# Altium footprint library 2019-12-09_06-57-52.PcbLib: 3 footprints
Each footprint in its own frame and in the unit in brackets; x right, y up, seen from the top. Pads: shape width x height; smd on the part's side, far side on the other; paste and mask are expansions set on the pad; w line width, h text height; cw(c..) or ccw(c..) is an arc to the next point about the centre after c.
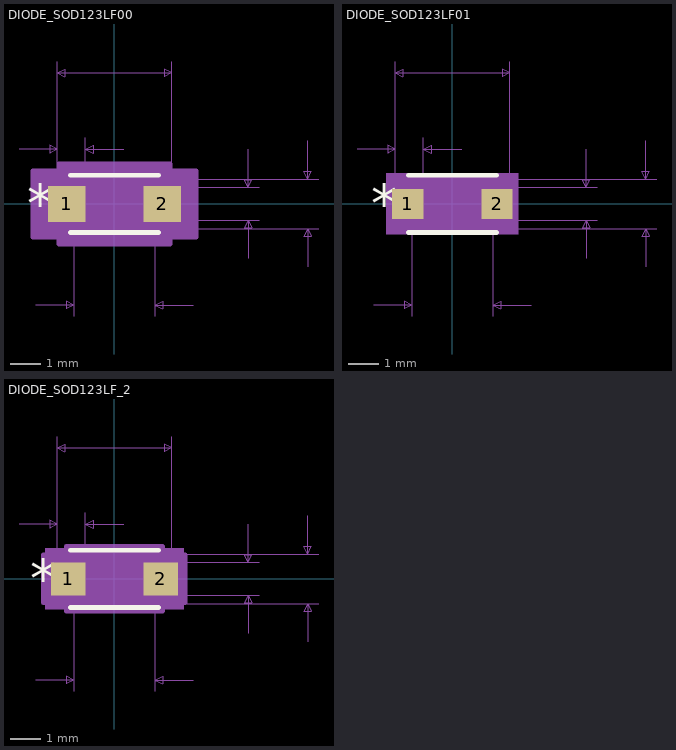
[diagram p0: the footprints below, top view; thin cyan lines are the x and y axes]

## DIODE_SOD123LF00 [mil]
pads (2):
  rect 49x47 smd paste+0 mask+0: 1(-62.5,0) 2(62.5,0)
Top Overlay:
  lines w6: -58,-37.5 58,-37.5 ; -58,37.5 58,37.5
  text "*" at -114.5,-25 h50
Mechanical 5:
  region: 94.5,-40 -94.5,-40 -94.5,40 94.5,40
Mechanical 7:
  lines w1: -125,71.5 -75,71.5 ; -103,-132.5 -53,-132.5 ; -75,86.5 -75,0 -75,186.5 ; -53,-147.5 -53,0 ; -38,0 -38,86.5 ; 0,-32.5 268,-32.5 ; 0,32.5 268,32.5 ; 12,71.5 -38,71.5 ; 53,-147.5 53,0 ; 75,-21.5 190,-21.5 ; 75,0 75,186.5 ; 75,21.5 190,21.5 ; 103,-132.5 53,-132.5 ; 175,-71.5 175,-21.5 ; 175,71.5 175,21.5 ; 253,-82.5 253,-32.5 ; 253,82.5 253,32.5 ; -75,71.5 -85,76.5 -85,66.5 -75,71.5 ; -75,171.5 75,171.5 ; -75,171.5 -65,176.5 -65,166.5 -75,171.5 ; -53,-132.5 -63,-127.5 -63,-137.5 -53,-132.5 ; -38,71.5 -28,76.5 -28,66.5 -38,71.5 ; 53,-132.5 63,-127.5 63,-137.5 53,-132.5 ; 75,171.5 65,176.5 65,166.5 75,171.5 ; 175,-21.5 170,-31.5 180,-31.5 175,-21.5 ; 175,21.5 170,31.5 180,31.5 175,21.5 ; 253,-32.5 248,-42.5 258,-42.5 253,-32.5 ; 253,32.5 248,42.5 258,42.5 253,32.5
  text "Default Padstyle: RX49Y47D0T" at -350,-348.5 h50
  text "Alt 1 Padstyle: OX60Y90D30P" at -337.5,-423.5 h50
  text "Alt 2 Padstyle: OX90Y60D30P" at -337.5,-498.5 h50
  text "0.15in/3.81mm" at -81.25,191.5 h25
  text "0.037in/0.94mm" at -144,91.5 h25
  text "0.043in/1.092mm" at 195,-12.5 h25
  text "0.065in/1.651mm" at 273,-12.5 h25
  text "0.106in/2.692mm" at -93.75,-177.5 h25
Mechanical 13:
  lines w1: -53,-16.25 -36.75,-32.5 ; -53,16.25 -36.75,32.5 ; -75,-21.5 -75,21.5 -53,21.5 -53,-21.5 -75,-21.5 ; -53,-32.5 53,-32.5 53,32.5 -53,32.5 -53,-32.5 ; 53,-21.5 53,21.5 75,21.5 75,-21.5 53,-21.5
  text "*" at -55.5,-25 h50
Mechanical 15:
  region: -73,-43.5 -107,-43.5 -107,43.5 -73,43.5 -73,52.5 73,52.5 73,43.5 107,43.5 107,-43.5 73,-43.5 73,-52.5 -73,-52.5
  lines w6: -107,-43.5 -107,43.5 -73,43.5 -73,52.5 73,52.5 73,43.5 107,43.5 107,-43.5 73,-43.5 73,-52.5 -73,-52.5 -73,-43.5 -107,-43.5
3D body: height 10, standoff 0, extent 0,0 10,10

## DIODE_SOD123LF01 [mil]
pads (2):
  rect 41x39 smd paste+0 mask+0: 1(-58.5,0) 2(58.5,0)
Top Overlay:
  lines w6: -58,-37.5 58,-37.5 ; -58,37.5 58,37.5
  text "*" at -106.5,-25 h50
Mechanical 5:
  region: 86.5,-40 -86.5,-40 -86.5,40 86.5,40
Mechanical 7:
  lines w1: -125,71.5 -75,71.5 ; -103,-132.5 -53,-132.5 ; -75,86.5 -75,0 -75,186.5 ; -53,-147.5 -53,0 ; -38,0 -38,86.5 ; 0,-32.5 268,-32.5 ; 0,32.5 268,32.5 ; 12,71.5 -38,71.5 ; 53,-147.5 53,0 ; 75,-21.5 190,-21.5 ; 75,0 75,186.5 ; 75,21.5 190,21.5 ; 103,-132.5 53,-132.5 ; 175,-71.5 175,-21.5 ; 175,71.5 175,21.5 ; 253,-82.5 253,-32.5 ; 253,82.5 253,32.5 ; -75,71.5 -85,76.5 -85,66.5 -75,71.5 ; -75,171.5 75,171.5 ; -75,171.5 -65,176.5 -65,166.5 -75,171.5 ; -53,-132.5 -63,-127.5 -63,-137.5 -53,-132.5 ; -38,71.5 -28,76.5 -28,66.5 -38,71.5 ; 53,-132.5 63,-127.5 63,-137.5 53,-132.5 ; 75,171.5 65,176.5 65,166.5 75,171.5 ; 175,-21.5 170,-31.5 180,-31.5 175,-21.5 ; 175,21.5 170,31.5 180,31.5 175,21.5 ; 253,-32.5 248,-42.5 258,-42.5 253,-32.5 ; 253,32.5 248,42.5 258,42.5 253,32.5
  text "Default Padstyle: RX41Y39D0T" at -350,-344.5 h50
  text "Alt 1 Padstyle: OX60Y90D30P" at -337.5,-419.5 h50
  text "Alt 2 Padstyle: OX90Y60D30P" at -337.5,-494.5 h50
  text "0.15in/3.81mm" at -81.25,191.5 h25
  text "0.037in/0.94mm" at -144,91.5 h25
  text "0.043in/1.092mm" at 195,-12.5 h25
  text "0.065in/1.651mm" at 273,-12.5 h25
  text "0.106in/2.692mm" at -93.75,-177.5 h25
Mechanical 13:
  lines w1: -53,-16.25 -36.75,-32.5 ; -53,16.25 -36.75,32.5 ; -75,-21.5 -75,21.5 -53,21.5 -53,-21.5 -75,-21.5 ; -53,-32.5 53,-32.5 53,32.5 -53,32.5 -53,-32.5 ; 53,-21.5 53,21.5 75,21.5 75,-21.5 53,-21.5
  text "*" at -55.5,-25 h50
Mechanical 15:
  region: -57,-23.5 -83,-23.5 -83,23.5 -57,23.5 -57,36.5 57,36.5 57,23.5 83,23.5 83,-23.5 57,-23.5 57,-36.5 -57,-36.5
  lines w6: -83,-23.5 -83,23.5 -57,23.5 -57,36.5 57,36.5 57,23.5 83,23.5 83,-23.5 57,-23.5 57,-36.5 -57,-36.5 -57,-23.5 -83,-23.5
3D body: height 10, standoff 0, extent 0,0 10,10

## DIODE_SOD123LF_2 [mil]
pads (2):
  rect 45x43 smd paste+0 mask+0: 1(-60.5,0) 2(60.5,0)
Top Overlay:
  lines w6: -58,-37.5 58,-37.5 ; -58,37.5 58,37.5
  text "*" at -110.5,-25 h50
Mechanical 5:
  region: 90.5,-40 -90.5,-40 -90.5,40 90.5,40
Mechanical 7:
  lines w1: -125,71.5 -75,71.5 ; -103,-132.5 -53,-132.5 ; -75,86.5 -75,0 -75,186.5 ; -53,-147.5 -53,0 ; -38,0 -38,86.5 ; 0,-32.5 268,-32.5 ; 0,32.5 268,32.5 ; 12,71.5 -38,71.5 ; 53,-147.5 53,0 ; 75,-21.5 190,-21.5 ; 75,0 75,186.5 ; 75,21.5 190,21.5 ; 103,-132.5 53,-132.5 ; 175,-71.5 175,-21.5 ; 175,71.5 175,21.5 ; 253,-82.5 253,-32.5 ; 253,82.5 253,32.5 ; -75,71.5 -85,76.5 -85,66.5 -75,71.5 ; -75,171.5 75,171.5 ; -75,171.5 -65,176.5 -65,166.5 -75,171.5 ; -53,-132.5 -63,-127.5 -63,-137.5 -53,-132.5 ; -38,71.5 -28,76.5 -28,66.5 -38,71.5 ; 53,-132.5 63,-127.5 63,-137.5 53,-132.5 ; 75,171.5 65,176.5 65,166.5 75,171.5 ; 175,-21.5 170,-31.5 180,-31.5 175,-21.5 ; 175,21.5 170,31.5 180,31.5 175,21.5 ; 253,-32.5 248,-42.5 258,-42.5 253,-32.5 ; 253,32.5 248,42.5 258,42.5 253,32.5
  text "Default Padstyle: RX45Y43D0T" at -350,-346.5 h50
  text "Alt 1 Padstyle: OX60Y90D30P" at -337.5,-421.5 h50
  text "Alt 2 Padstyle: OX90Y60D30P" at -337.5,-496.5 h50
  text "0.15in/3.81mm" at -81.25,191.5 h25
  text "0.037in/0.94mm" at -144,91.5 h25
  text "0.043in/1.092mm" at 195,-12.5 h25
  text "0.065in/1.651mm" at 273,-12.5 h25
  text "0.106in/2.692mm" at -93.75,-177.5 h25
Mechanical 13:
  lines w1: -53,-16.25 -36.75,-32.5 ; -53,16.25 -36.75,32.5 ; -75,-21.5 -75,21.5 -53,21.5 -53,-21.5 -75,-21.5 ; -53,-32.5 53,-32.5 53,32.5 -53,32.5 -53,-32.5 ; 53,-21.5 53,21.5 75,21.5 75,-21.5 53,-21.5
  text "*" at -55.5,-25 h50
Mechanical 15:
  region: -63,-31.5 -93,-31.5 -93,31.5 -63,31.5 -63,42.5 63,42.5 63,31.5 93,31.5 93,-31.5 63,-31.5 63,-42.5 -63,-42.5
  lines w6: -93,-31.5 -93,31.5 -63,31.5 -63,42.5 63,42.5 63,31.5 93,31.5 93,-31.5 63,-31.5 63,-42.5 -63,-42.5 -63,-31.5 -93,-31.5
3D body: height 10, standoff 0, extent 0,0 10,10